# Altium schematic symbol library SamacSys.SchLib: 1235 symbols (part 6 of 13)
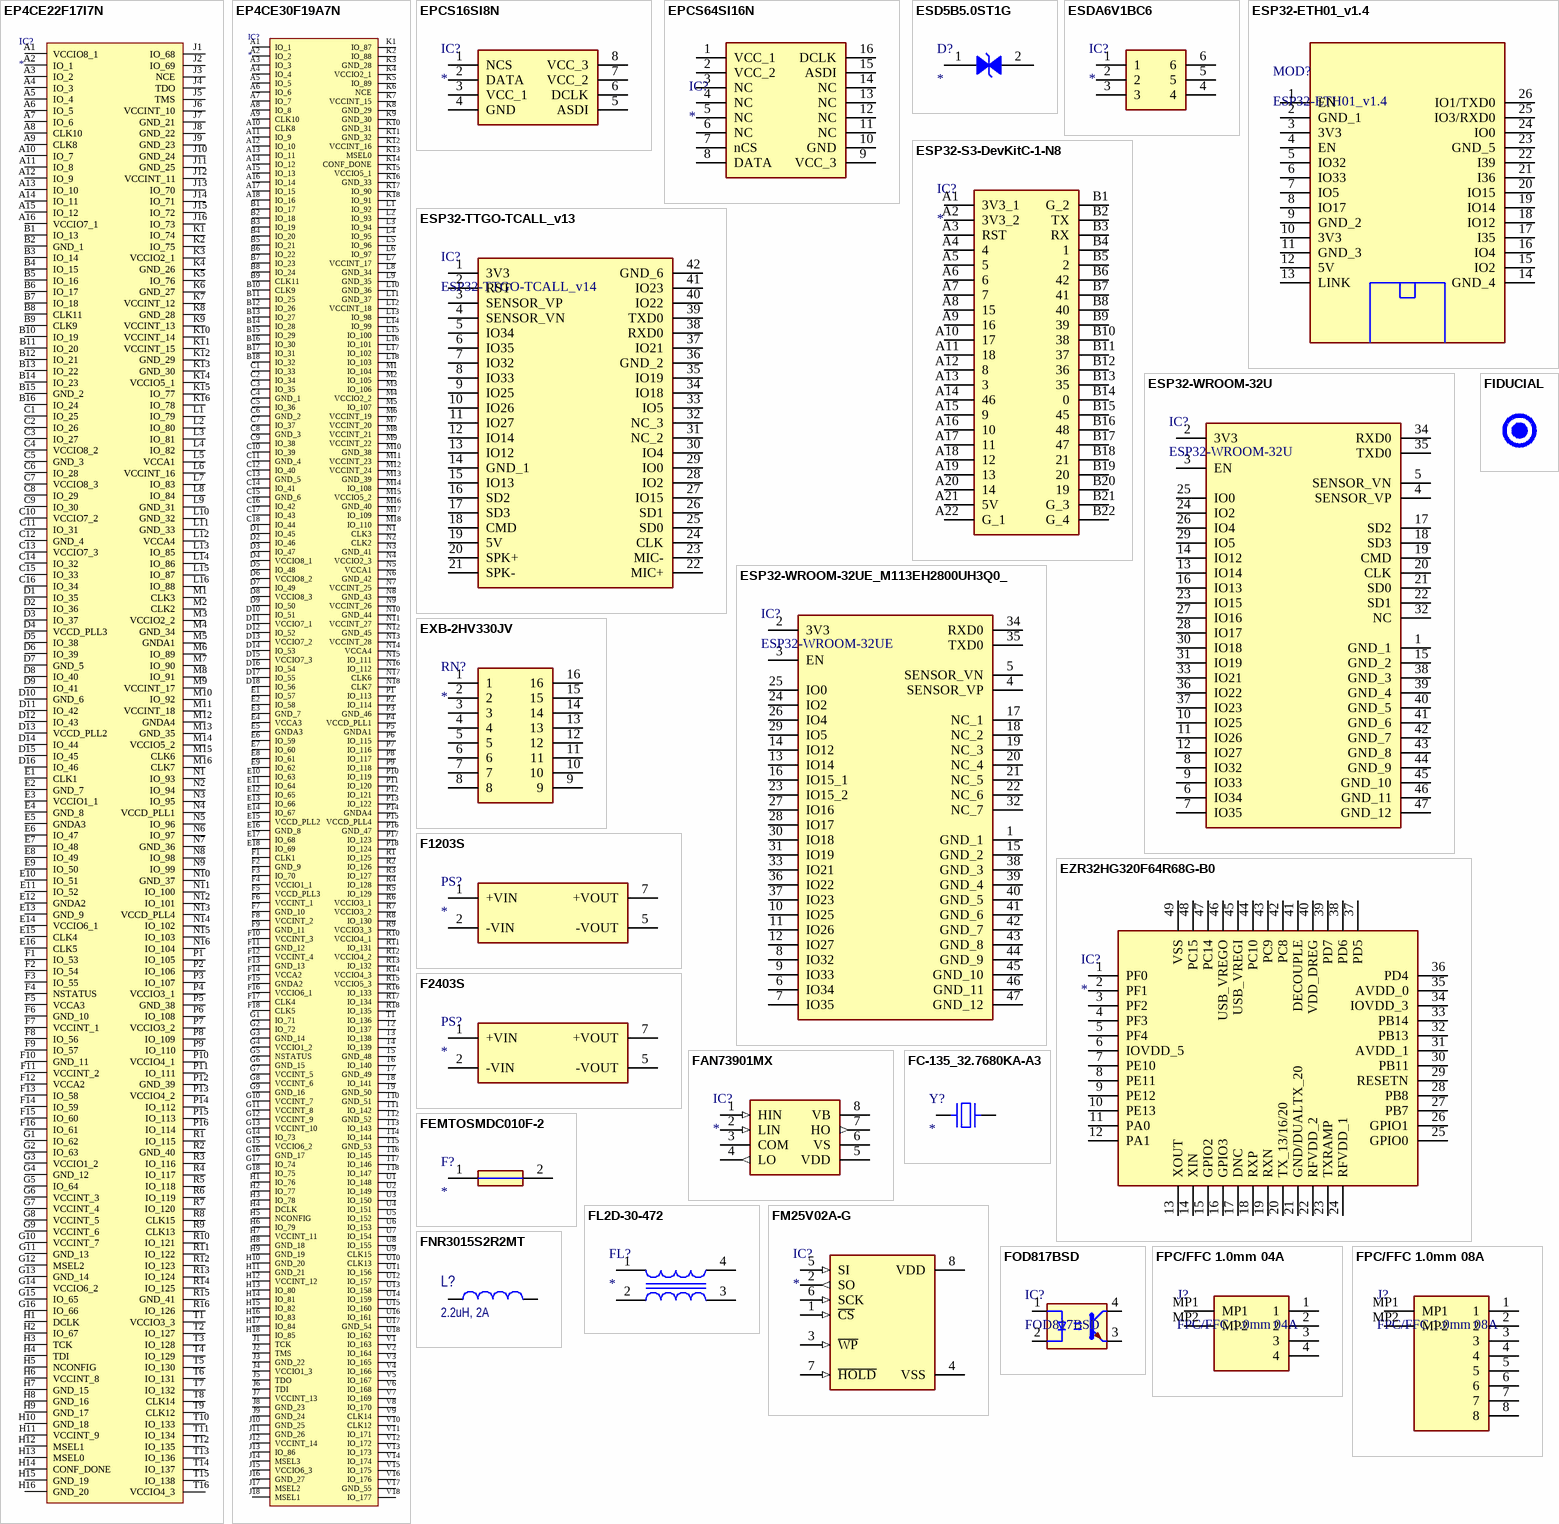
[diagram p50: symbols EP4CE22F17I7N to FPC/FFC 1.0mm 08A]

## FEMTOSMDC010F-2
designator F?
Fuse; Manufacturer_Name: LITTELFUSE; Manufacturer_Part_Number: FEMTOSMDC010F-2; Datasheet Link: https://www.mouser.com/datasheet/2/240/Littelfuse_PTC_FEMTOSMD_Catalog_Datasheet.pdf-1021717.pdf; Height: 0.85mm; Mouser Part Number: 650-FEMTOSMDC010F-2; Mouser Price/Stock: https://www.mouser.co.uk/ProductDetail/Littelfuse/FEMTOSMDC010F-2?qs=pBN%2FbMTRZdfivGqCKpN9Gw%3D%3D; Arrow Part Number: FEMTOSMDC010F-2; Arrow Price/Stock: https://www.arrow.com/en/products/femtosmdc010f-2/littelfuse?region=nac
footprint FUSC1608X85N (Footprint not found)
pins: 1, 2

## FIDUCIAL
designator FID?, comment Fiducial Point  (value not drawn)  (no BOM)
footprint fiducial_1_3 (Fiducial point Medium IN 1mm OUT 3mm)
footprint fiducial_1_2 (Fiducial point Small IN 1mm OUT 2mm)

## FL2D-30-472
designator FL?
Filter; Manufacturer_Name: Mornsun Power; Manufacturer_Part_Number: FL2D-30-472; Datasheet Link: https://www.mornsun-power.com/html/pdf/FL2D-30-472.html; Height: 23.5mm
footprint FL2D30472
pins: 1, 2, 3, 4

## FM25V02A-G
designator IC?
Integrated Circuit; Manufacturer_Name: Infineon; Manufacturer_Part_Number: FM25V02A-G; Datasheet Link: https://componentsearchengine.com/Datasheets/1/FM25V02A-G.pdf; Height: 1.549mm; Arrow Part Number: FM25V02A-G; Arrow Price/Stock: https://www.arrow.com/en/products/fm25v02a-g/infineon-technologies-ag?region=europe
footprint SOT127P602X155-8N
pins: 1 ~{CS} (in), 2 SO (out), 3 ~{WP} (in), 4 VSS (power), 5 SI (in), 6 SCK (in), 7 ~{HOLD} (in), 8 VDD (power)

## FNR3015S2R2MT
designator L?, comment 2.2uH, 2A
Inductor; Manufacturer: cjiang; Manufacturer Part Number: FNR3015S2R2MT; LCSC Part #: C167747
footprint FNR3015S
pins: 1, 2

## FOD817BSD
designator IC?
OPTOISOLATOR 5KV 1CH TRANS 4-SMD; Manufacturer_Name: onsemi; Datasheet Link: https://www.onsemi.com/pub/Collateral/FOD814-D.PDF; Height: 3.85mm; Manufacturer_Part_Number: FOD817BSD; Mouser Part Number: 512-FOD817BSD; Mouser Price/Stock: https://www.mouser.co.uk/ProductDetail/onsemi-Fairchild/FOD817BSD?qs=rOFvSC%252BbttTW%252BrbYJDyoCQ%3D%3D; Arrow Part Number: FOD817BSD; Arrow Price/Stock: null?region=asia
footprint SOP254P1016X385-4N (Footprint not found)
pins: 1, 2, 3, 4

## FPC/FFC 1.0mm 04A
designator J?
Connector, FFC, 4pin, 1mm; Manufacturer_Name: Ruichi; Datasheet Link: https://static.chipdip.ru/lib/135/DOC062135222.pdf; Height: 2.5mm
footprint LW10251-04 (FFC 1mm 4pin)
pins: 1, 2, 3, 4, MP1, MP2

## FPC/FFC 1.0mm 08A
designator J?
Connector, FFC, 8pin, 1mm; Manufacturer_Name: Ruichi; Datasheet Link: https://static.chipdip.ru/lib/135/DOC062135222.pdf; Height: 2.5
footprint LW10251-08 (FFC 1mm 8pin)
pins: 1, 2, 3, 4, 5, 6, 7, 8, MP1, MP2

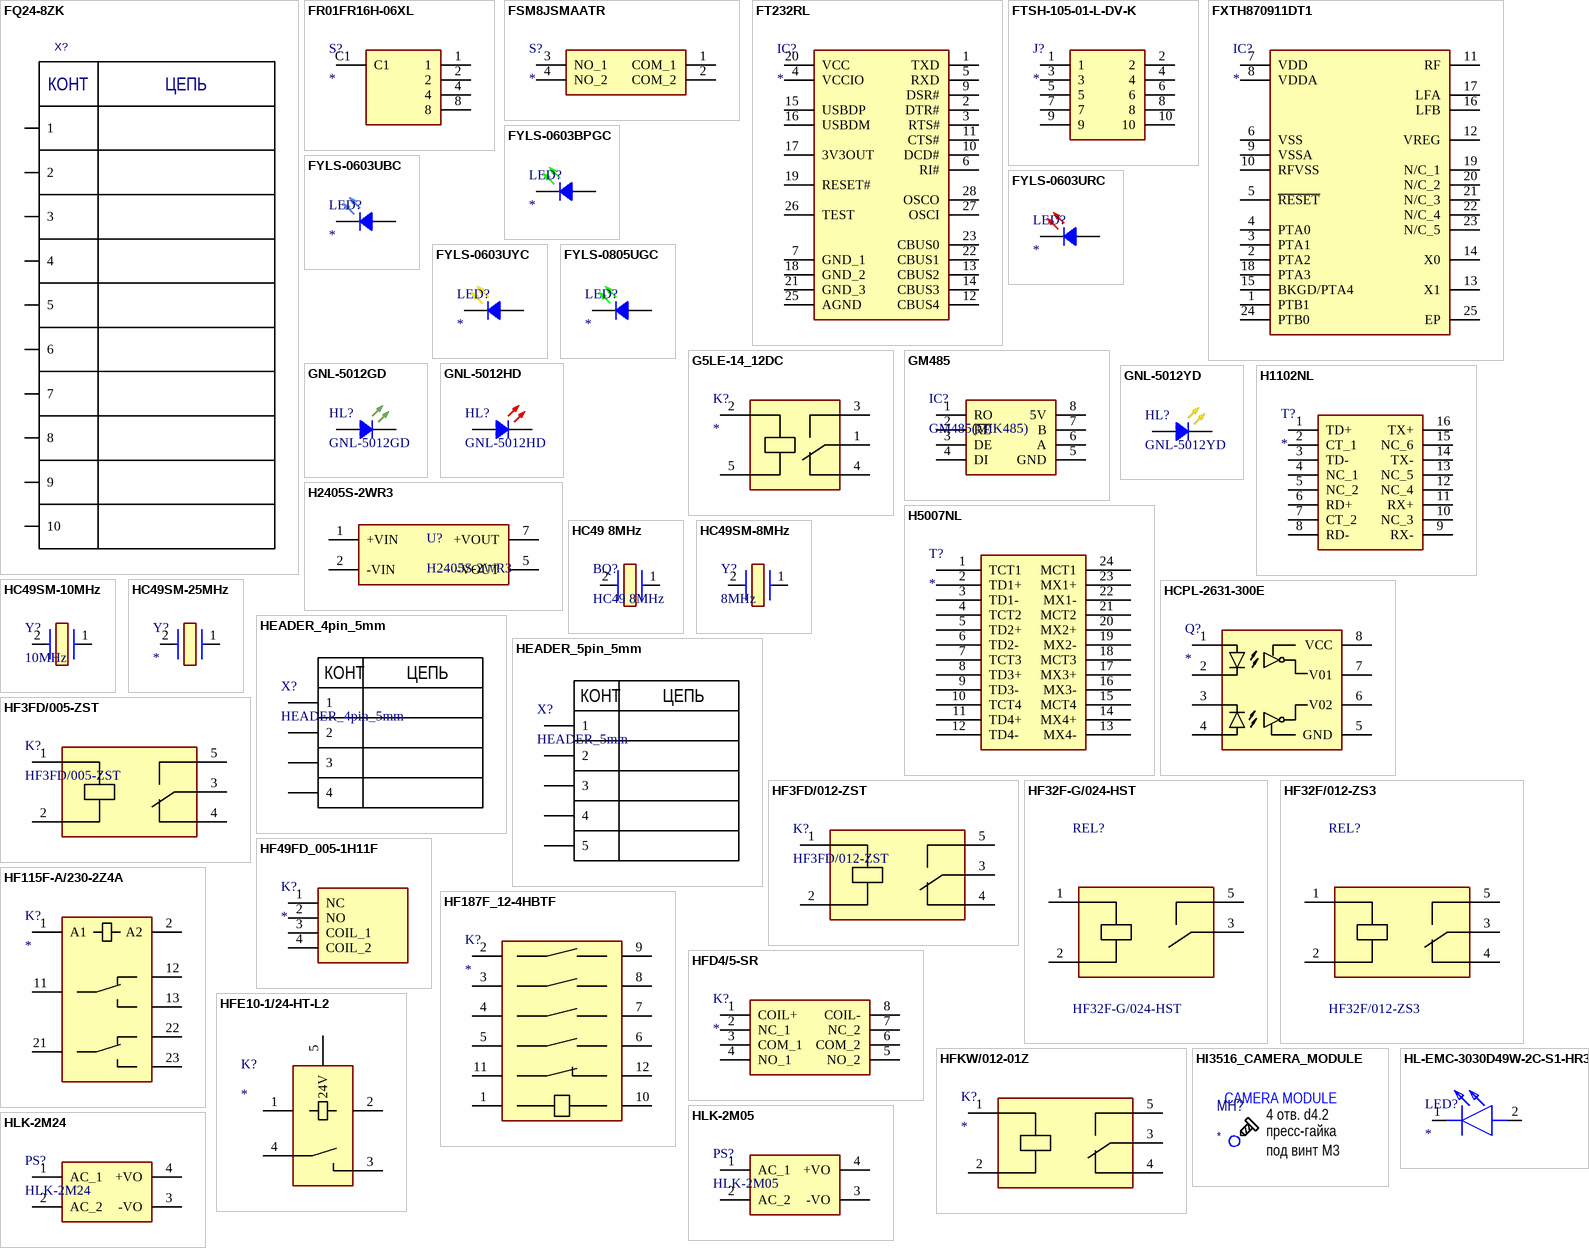
[diagram p17: symbols FQ24-8ZK to HLK-2M24]

## FQ24-8ZK
designator X?  (value not drawn)
Connector; Part Number: FQ24-8ZK; System: Connector
footprint FQ24-8ZK
pins: 1, 2, 3, 4, 5, 6, 7, 8, 9, 10
text: КОНТ; ЦЕПЬ

## FR01FR16H-06XL
designator S?
Switch; Manufacturer_Name: NKK Switches; Manufacturer_Part_Number: FR01FR16H-06XL; Datasheet Link: https://www.nkkswitches.com/pdf/FR01-2.pdf; Height: 10mm; Mouser Part Number: 633-FR01FR16H-06XL; Mouser Price/Stock: https://www.mouser.co.uk/ProductDetail/NKK-Switches/FR01FR16H-06XL?qs=g%252BEszo6zu8NJkaATc7RflA%3D%3D; Arrow Part Number: FR01FR16H-06XL; Arrow Price/Stock: https://www.arrow.com/en/products/fr01fr16h-06xl/nkk-switches
footprint FR01FR16H06XL
pins: 1, 2, 4, 8, C1

## FSM8JSMAATR
designator S?
Switch; Manufacturer_Name: TE Connectivity; Manufacturer_Part_Number: FSM8JSMAATR; Datasheet Link: https://www.mouser.co.uk/datasheet/2/418/1/NG_CD_2-1437565-7_V-1100109.pdf; Mouser Part Number: 506-FSM8JSMAATR; Mouser Price/Stock: https://www.mouser.co.uk/ProductDetail/TE-Connectivity-PB/FSM8JSMAATR?qs=jiqFPbo5wQUL4VmJsE%2Fhuw%3D%3D; Arrow Part Number: FSM8JSMAATR; Arrow Price/Stock: https://www.arrow.com/en/products/fsm8jsmaatr/te-connectivity?utm_currency=USD&region=nac
footprint FSM8JSMAATR
pins: 1 COM_1, 2 COM_2, 3 NO_1, 4 NO_2

## FT232RL
designator IC?
Integrated Circuit; Manufacturer_Name: FTDI Chip; Manufacturer_Part_Number: FT232RL-TUBE; Datasheet Link: http://www.ftdichip.com/Support/Documents/DataSheets/ICs/DS_FT232R.pdf; Height: 2mm; Mouser Part Number: 895-FT232RL-TUBE; Mouser Price/Stock: https://www.mouser.co.uk/ProductDetail/FTDI/FT232RL-TUBE?qs=D1%2FPMqvA100UF95YMvGN8w%3D%3D; Arrow Part Number: FT232RL-TUBE; Arrow Price/Stock: https://www.arrow.com/en/products/ft232rl-tube/ftdi-chip
footprint SOP65P780X200-28N
pins: 1 TXD, 2 DTR#, 3 RTS#, 4 VCCIO, 5 RXD, 6 RI#, 7 GND_1, 9 DSR#, 10 DCD#, 11 CTS#, 12 CBUS4, 13 CBUS2, 14 CBUS3, 15 USBDP, 16 USBDM, 17 3V3OUT, 18 GND_2, 19 RESET#, 20 VCC, 21 GND_3, 22 CBUS1, 23 CBUS0, 25 AGND, 26 TEST, 27 OSCI, 28 OSCO

## FTSH-105-01-L-DV-K
designator J?
Connector; Manufacturer_Name: SAMTEC; Manufacturer_Part_Number: FTSH-105-01-L-DV-K; Datasheet Link: https://www.arrow.com/en/products/ftsh-105-01-l-dv-k/samtec; Height: 6.1mm; Mouser Part Number: 200-FTSH10501LDVK; Mouser Price/Stock: https://www.mouser.co.uk/ProductDetail/Samtec/FTSH-105-01-L-DV-K?qs=%252B5JSS813miOqo3Vy%252BvhCFg%3D%3D; Arrow Part Number: FTSH-105-01-L-DV-K; Arrow Price/Stock: https://www.arrow.com/en/products/ftsh-105-01-l-dv-k/samtec?region=europe
footprint FTSH10501LDVK
pins: 1, 2, 3, 4, 5, 6, 7, 8, 9, 10

## FXTH870911DT1
designator IC?
Integrated Circuit; Manufacturer_Name: NXP; Manufacturer_Part_Number: FXTH870911DT1; Datasheet Link: https://datasheet.datasheetarchive.com/originals/distributors/DKDS-7/124449.pdf; Height: 2.3mm; Mouser Part Number: 841-FXTH870911DT1; Mouser Price/Stock: https://www.mouser.co.uk/ProductDetail/NXP-Semiconductors/FXTH870911DT1?qs=y0HsvvugQ47vJCxCR%252BmP0w%3D%3D; Arrow Part Number: FXTH870911DT1; Arrow Price/Stock: https://www.arrow.com/en/products/fxth870911dt1/nxp-semiconductors
footprint QFN100P700X700X230-25N-D
pins: 1 PTB1, 2 PTA2, 3 PTA1, 4 PTA0, 5 ~{RESET}, 6 VSS, 7 VDD, 8 VDDA, 9 VSSA, 10 RFVSS, 11 RF, 12 VREG, 13 X1, 14 X0, 15 BKGD/PTA4, 16 LFB, 17 LFA, 18 PTA3, 19 N/C_1, 20 N/C_2, 21 N/C_3, 22 N/C_4, 23 N/C_5, 24 PTB0, 25 EP

## FYLS-0603BPGC
designator LED?
LED, 0603, GREEN; Manufacturer_Name: FORYARD; Manufacturer_Part_Number: FYLS-0603BPGC; Datasheet Link: https://v4.cecdn.yun300.cn/100001_2003185297/7%20FYLS-0603BXXXC-D.pdf; Height: 0.6mm
footprint LEDC1608X55N_GREEN
pins: 1 A, 2 C

## FYLS-0603UBC
designator LED?
LED, 0603, BLUE; Manufacturer_Name: FORYARD; Manufacturer_Part_Number: FYLS-0603UBC; Datasheet Link: https://v4.cecdn.yun300.cn/100001_2003185297/7%20FYLS-0603BXXXC-D.pdf; Height: 0.6mm
footprint LEDC1608X55N_BLUE
pins: 1 A, 2 C

## FYLS-0603URC
designator LED?
LED, 0603, RED; Manufacturer_Name: FORYARD; Manufacturer_Part_Number: FYLS-0603URC; Datasheet Link: https://v4.cecdn.yun300.cn/100001_2003185297/7%20FYLS-0603BXXXC-D.pdf; Height: 0.6mm
footprint LEDC1608X55N_RED
pins: 1 A, 2 C

## FYLS-0603UYC
designator LED?
LED, 0603, YELLOW; Manufacturer_Name: FORYARD; Manufacturer_Part_Number: FYLS-0603UYC; Datasheet Link: https://v4.cecdn.yun300.cn/100001_2003185297/7%20FYLS-0603BXXXC-D.pdf; Height: 0.6mm
footprint LEDC1608X55N_YELLOW
pins: 1 A, 2 C

## FYLS-0805UGC
designator LED?
LED, 0805, GREEN; Manufacturer_Name: FORYARD; Manufacturer_Part_Number: FYLS-0805UGC; Datasheet Link: https://v4.cecdn.yun300.cn/100001_2003185297/7%20FYLS-0603BXXXC-D.pdf; Height: 0.6mm
footprint LEDC2012X110N
pins: 1 A, 2 C

## G5LE-14_12DC
designator K?
Relay; Manufacturer_Name: Omron Electronics; Manufacturer_Part_Number: G5LE-14 12DC; Datasheet Link: https://www.omron.com/ecb/products/pdf/en-g5le.pdf; Arrow Part Number: G5LE-14 12DC; Arrow Price/Stock: https://www.arrow.com/en/products/g5le1412dc/omron
footprint G5LE-1
pins: 1 COIL_1, 2 NC, 3 NO, 4 COIL_2, 5 COM

## GM485
designator IC?, comment GM485(MIK485)
Integrated Circuit, RS-485; Manufacturer_Name: Analog Devices; Manufacturer_Part_Number: ADM3485ARZ; Datasheet Link: https://tellur-el.ru/upload/iblock/10b/f24nra7n0usjcjwdd7j1s1y0al2gk06p.pdf; Height: 1.75mm; Mouser Part Number: 584-ADM3485ARZ; Mouser Price/Stock: https://www.mouser.co.uk/ProductDetail/Analog-Devices/ADM3485ARZ?qs=BpaRKvA4VqFcLMPh5cVl%252BQ%3D%3D; Arrow Part Number: ADM3485ARZ; Arrow Price/Stock: https://www.arrow.com/en/products/adm3485arz/analog-devices?region=nac
footprint SOIC127P600X175-8N
pins: 1 RO, 2 ~{RE}, 3 DE, 4 DI, 5 GND, 6 A, 7 B, 8 5V

## GNL-5012GD
designator HL?
LED, 5mm, Green; Manufacturer_Name: G-NOR ELECTRONICS; Datasheet Link: https://static.chipdip.ru/lib/796/DOC059796154.pdf; Manufacturer_Part_Number: GNL-5012GD
footprint LED_5mm_green (Footprint not found)
pins: 1 C, 2 A

## GNL-5012HD
designator HL?
LED, 5mm, Red; Manufacturer_Name: G-NOR ELECTRONICS; Datasheet Link: https://static.chipdip.ru/lib/815/DOC059815856.pdf; Manufacturer_Part_Number: GNL-5012HD
footprint LED_5mm_red
pins: 1 C, 2 A

## GNL-5012YD
designator HL?
LED, 5mm, Green; Manufacturer_Name: G-NOR ELECTRONICS; Datasheet Link: https://static.chipdip.ru/lib/796/DOC059796154.pdf; Manufacturer_Part_Number: GNL-5012YD
footprint LED_5mm_yellow
pins: 1 C, 2 A

## H1102NL
designator T?
Transformer; Manufacturer_Name: Pulse Electronics; Manufacturer_Part_Number: H1102NL; Datasheet Link: https://productfinder.pulseeng.com/products/datasheets/h1102nl.pdf; Height: 5.97mm; Mouser Part Number: 673-H1102NL; Mouser Price/Stock: https://www.mouser.co.uk/ProductDetail/Pulse-Electronics/H1102NL?qs=EKu32SdDin%2FHU33L94JZxw%3D%3D; Arrow Part Number: H1102NL; Arrow Price/Stock: https://www.arrow.com/en/products/h1102nl/pulse-electronics-corporation?region=europe
footprint SOIC127P940X597-16N
pins: 1 TD+, 2 CT_1, 3 TD-, 4 NC_1, 5 NC_2, 6 RD+, 7 CT_2, 8 RD-, 9 RX-, 10 NC_3, 11 RX+, 12 NC_4, 13 NC_5, 14 TX-, 15 NC_6, 16 TX+

## H2405S-2WR3
designator U?
Power Supply, 2W isolated, DIP
footprint H_S-2WR3
pins: 1 +VIN, 2 -VIN, 5 -VOUT, 7 +VOUT

## H5007NL
designator T?
Transformer; Manufacturer_Name: Pulse Electronics; Manufacturer_Part_Number: H5007NL; Datasheet Link: https://productfinder.pulseeng.com/products/datasheets/HC500.pdf; Height: 5.51mm; Mouser Part Number: 673-H5007NL; Mouser Price/Stock: https://www.mouser.co.uk/ProductDetail/Pulse-Electronics/H5007NL?qs=EKu32SdDin9FBxETK8sXDg%3D%3D; Arrow Part Number: H5007NL; Arrow Price/Stock: https://www.arrow.com/en/products/h5007nl/pulse-electronics-corporation?region=nac
footprint SOIC127P1600X551-24N
pins: 1 TCT1, 2 TD1+, 3 TD1-, 4 TCT2, 5 TD2+, 6 TD2-, 7 TCT3, 8 TD3+, 9 TD3-, 10 TCT4, 11 TD4+, 12 TD4-, 13 MX4-, 14 MX4+, 15 MCT4, 16 MX3-, 17 MX3+, 18 MCT3, 19 MX2-, 20 MX2+, 21 MCT2, 22 MX1-, 23 MX1+, 24 MCT1

## HC49 8MHz
designator BQ?
Crystal or Oscillator; Manufacturer_Name: QUARTZ HC-49; Height: 3.5mm; Manufacturer_Part_Number: 8 MHz
footprint HC49
pins: 1, 2 CRYSTAL_2

## HC49SM-8MHz
designator Y?, comment 8MHz
Crystal or Oscillator; Manufacturer_Part_Number: HC49SM-25MHz; Height: 4mm
footprint HC49SM (Footprint not found)
pins: 1, 2

## HC49SM-10MHz
designator Y?, comment 10MHz
Crystal or Oscillator; Manufacturer_Part_Number: HC49SM-10MHz; Height: 4mm
footprint HC49SM (Footprint not found)
pins: 1, 2

## HC49SM-25MHz
designator Y?
Crystal or Oscillator; Manufacturer_Part_Number: HC49SM-25MHz; Height: 4mm
footprint HC49SM1230506016ATF
footprint HC49
pins: 1, 2

## HCPL-2631-300E
designator Q?
Phototransistor; Manufacturer_Name: Avago Technologies; Manufacturer_Part_Number: HCPL-2631-300E; Datasheet Link: https://www.mouser.com/datasheet/2/678/V02-0940EN_DS_6N137_2018-03-23-1112306.pdf; Mouser Part Number: 630-HCPL-2631-300E; Mouser Price/Stock: https://www.mouser.co.uk/ProductDetail/Broadcom-Avago/HCPL-2631-300E?qs=s%252BgfxR24RQ5y0yf12DdOLQ%3D%3D
footprint HCPL2200300E
pins: 1 A_1, 2 K_1, 3 K_2, 4 A_2, 5 GND, 6 V02, 7 V01, 8 VCC

## HEADER_4pin_5mm
designator X?  (no BOM)
Connector
footprint HEADER_4pin_5mm (Footprint not found)
pins: 1, 2, 3, 4
text: КОНТ; ЦЕПЬ

## HEADER_5pin_5mm
designator X?, comment HEADER_5mm  (no BOM)
Connector
footprint HEADER_5pin_5mm (Footprint not found)
pins: 1, 2, 3, 4, 5
text: КОНТ; ЦЕПЬ

## HF3FD/005-ZST
designator K?
Relay, 5V Coil, Form C; Manufacturer_Name: Hongfa; Datasheet Link: http://www.hongfaamerica.com/hq/PDF/HF3FD_en.pdf; Height: 15.9mm; Manufacturer_Part_Number: HF3FD/005-ZST
footprint HF3FD012ZTF257
pins: 1 COIL_1, 2 NC, 3 NO, 4 COIL_2, 5 COM

## HF3FD/012-ZST
designator K?
Relay, 12V Coil, 5V/240VAC, Form C; Manufacturer_Name: Hongfa; Datasheet Link: http://www.hongfaamerica.com/hq/PDF/HF3FD_en.pdf; Height: 15.9mm; Manufacturer_Part_Number: HF3FD/012-ZST
footprint HF3FD012ZTF257
pins: 1 COIL_1, 2 NC, 3 NO, 4 COIL_2, 5 COM

## HF32F-G/024-HST
designator REL?
Power Relay 24VDC COIL 10A, 1 Form A
footprint HF32F
pins: 1 COIL_1, 2 NC, 3 NO, 5 COM

## HF32F/012-ZS3
designator REL?
Power Relay 12VDC COIL 10A, 1 Form C
footprint HF32F
pins: 1 COIL_1, 2 NC, 3 NO, 4 COIL_2, 5 COM

## HF49FD_005-1H11F
designator K?
Relay or Contactor; Manufacturer_Name: Hongfa; Manufacturer_Part_Number: HF49FD/005-1H11F; Datasheet Link: https://www.tme.eu/en/Document/f3d887acae5a2f74997c256c6736c56d/HF49FD_en.pdf; Height: 12mm
footprint HF49FD0051H11F
pins: 1 NC, 2 NO, 3 COIL_1, 4 COIL_2

## HF115F-A/230-2Z4A
designator K?
Relay o; Manufacturer_Name: Hongfa; Manufacturer_Part_Number: HF115F-A/230-2Z4A; Datasheet Link: https://www.promelec.ru/fs/sources/18/1d/46/29/ea14cb585d76c992e04a6d48.pdf; Height: 16mm; Arrow Part Number: HF115FK/12-2Z4T(610); Arrow Price/Stock: https://www.arrow.com/en/products/hf115fk12-2z4t-610/hongfa-europe-gmbh
footprint HF115FK122Z4T610
pins: 1 A1, 2 A2, 11 1_COM, 12 1_NC, 13 1_NO, 21 2_COM, 22 2_NC, 23 2_NO

## HF187F_12-4HBTF
designator K?
Relay or Contactor; Manufacturer_Name: Hongfa; Manufacturer_Part_Number: HF187F/12-4HBTF; Datasheet Link: https://source.hongfa.com//pdf/web/viewer.html?file=\Uploads\Product\PDF\HF187F_en.pdf&timestamp=1680773911; Height: 47mm
footprint HF187F124HBTF
pins: 1 COIL_1, 2 NO_1, 3 NO_2, 4 NO_3, 5 NO_4, 6 COM_1, 7 COM_2, 8 COM_3, 9 COM_4, 10 COIL_2, 11 NC, 12 COM_5

## HFD4/5-SR
designator K?
Relay or Contactor; Manufacturer_Name: Hongfa; Manufacturer_Part_Number: HFD4/4.5-SR; Datasheet Link: https://source.hongfa.com//Api/DownloadPdf/353; Height: 6.05mm; Arrow Part Number: HFD4/4.5-SR; Arrow Price/Stock: https://www.arrow.com/en/products/hfd44.5-sr/hongfa-europe-gmbh?region=europe
footprint HFD445SR
pins: 1 COIL+, 2 NC_1, 3 COM_1, 4 NO_1, 5 NO_2, 6 COM_2, 7 NC_2, 8 COIL-

## HFE10-1/24-HT-L2
designator K?
Relay, 50A, 24V; Manufacturer_Name: Hongfa; Manufacturer_Part_Number: HFE10-1/24-HT-L2; Datasheet Link: https://cdn.promelec.ru/upload/items/2020/09/08/hfe10_en.pdf; Height: 30; Arrow Part Number: HF115FK/12-2Z4T(610); Arrow Price/Stock: https://www.arrow.com/en/products/hf115fk12-2z4t-610/hongfa-europe-gmbh
footprint HFE10112HSTL2257
pins: 1 A1, 2 A2, 3 NO, 4 COM, 5 24V

## HFKW/012-01Z
designator K?
Relay; Manufacturer_Name: HF(Xiamen Hongfa Electroacoustic); Manufacturer_Part_Number: HFKW/012-1Z; Datasheet Link: https://img.ozdisan.com/ETicaret_Dosya/341245_8627675.pdf; Height: 15.5mm; LCSC Part #: C9221
footprint HFKW Relay
pins: 1 COIL_1, 2 NC, 3 NO, 4 COIL_2, 5 COM

## HI3516_CAMERA_MODULE
designator MH?
4 * KF2-M3
footprint CAMERA_MODULE (Footprint not found)
text: CAMERA MODULE; 4 отв. d4.2; пресс-гайка; под винт M3

## HL-EMC-3030D49W-2C-S1-HR3
designator LED?
LED; Manufacturer_Name: Hongli Zhihui (HONGLITRONIC); Manufacturer_Part_Number: HL-EMC-3030D49W-2C-S1-HR3; Datasheet Link: https://4donline.ihs.com/images/VipMasterIC/IC/GHTC/GHTCS01244/GHTCS01244-1.pdf?hkey=EF798316E3902B6ED9A73243A3159BB0; Height: 0.67mm
footprint HLEMC3030D49W2CS1HR3
pins: 1 K, 2 A

## HLK-2M05
designator PS?
Power Supply 2W 220VAC 5VDC 400mA; Manufacturer_Name: Hi-Link; Height: 19mm; Manufacturer_Part_Number: HLK-2M05
footprint HLK2M
pins: 1 AC_1, 2 AC_2, 3 -VO, 4 +VO

## HLK-2M24
designator PS?
Power Supply 2W 220VAC 24VDC 83mA; Manufacturer_Name: Hi-Link; Height: 19mm; Manufacturer_Part_Number: HLK-2M24
footprint HLK2M
pins: 1 AC_1, 2 AC_2, 3 -VO, 4 +VO

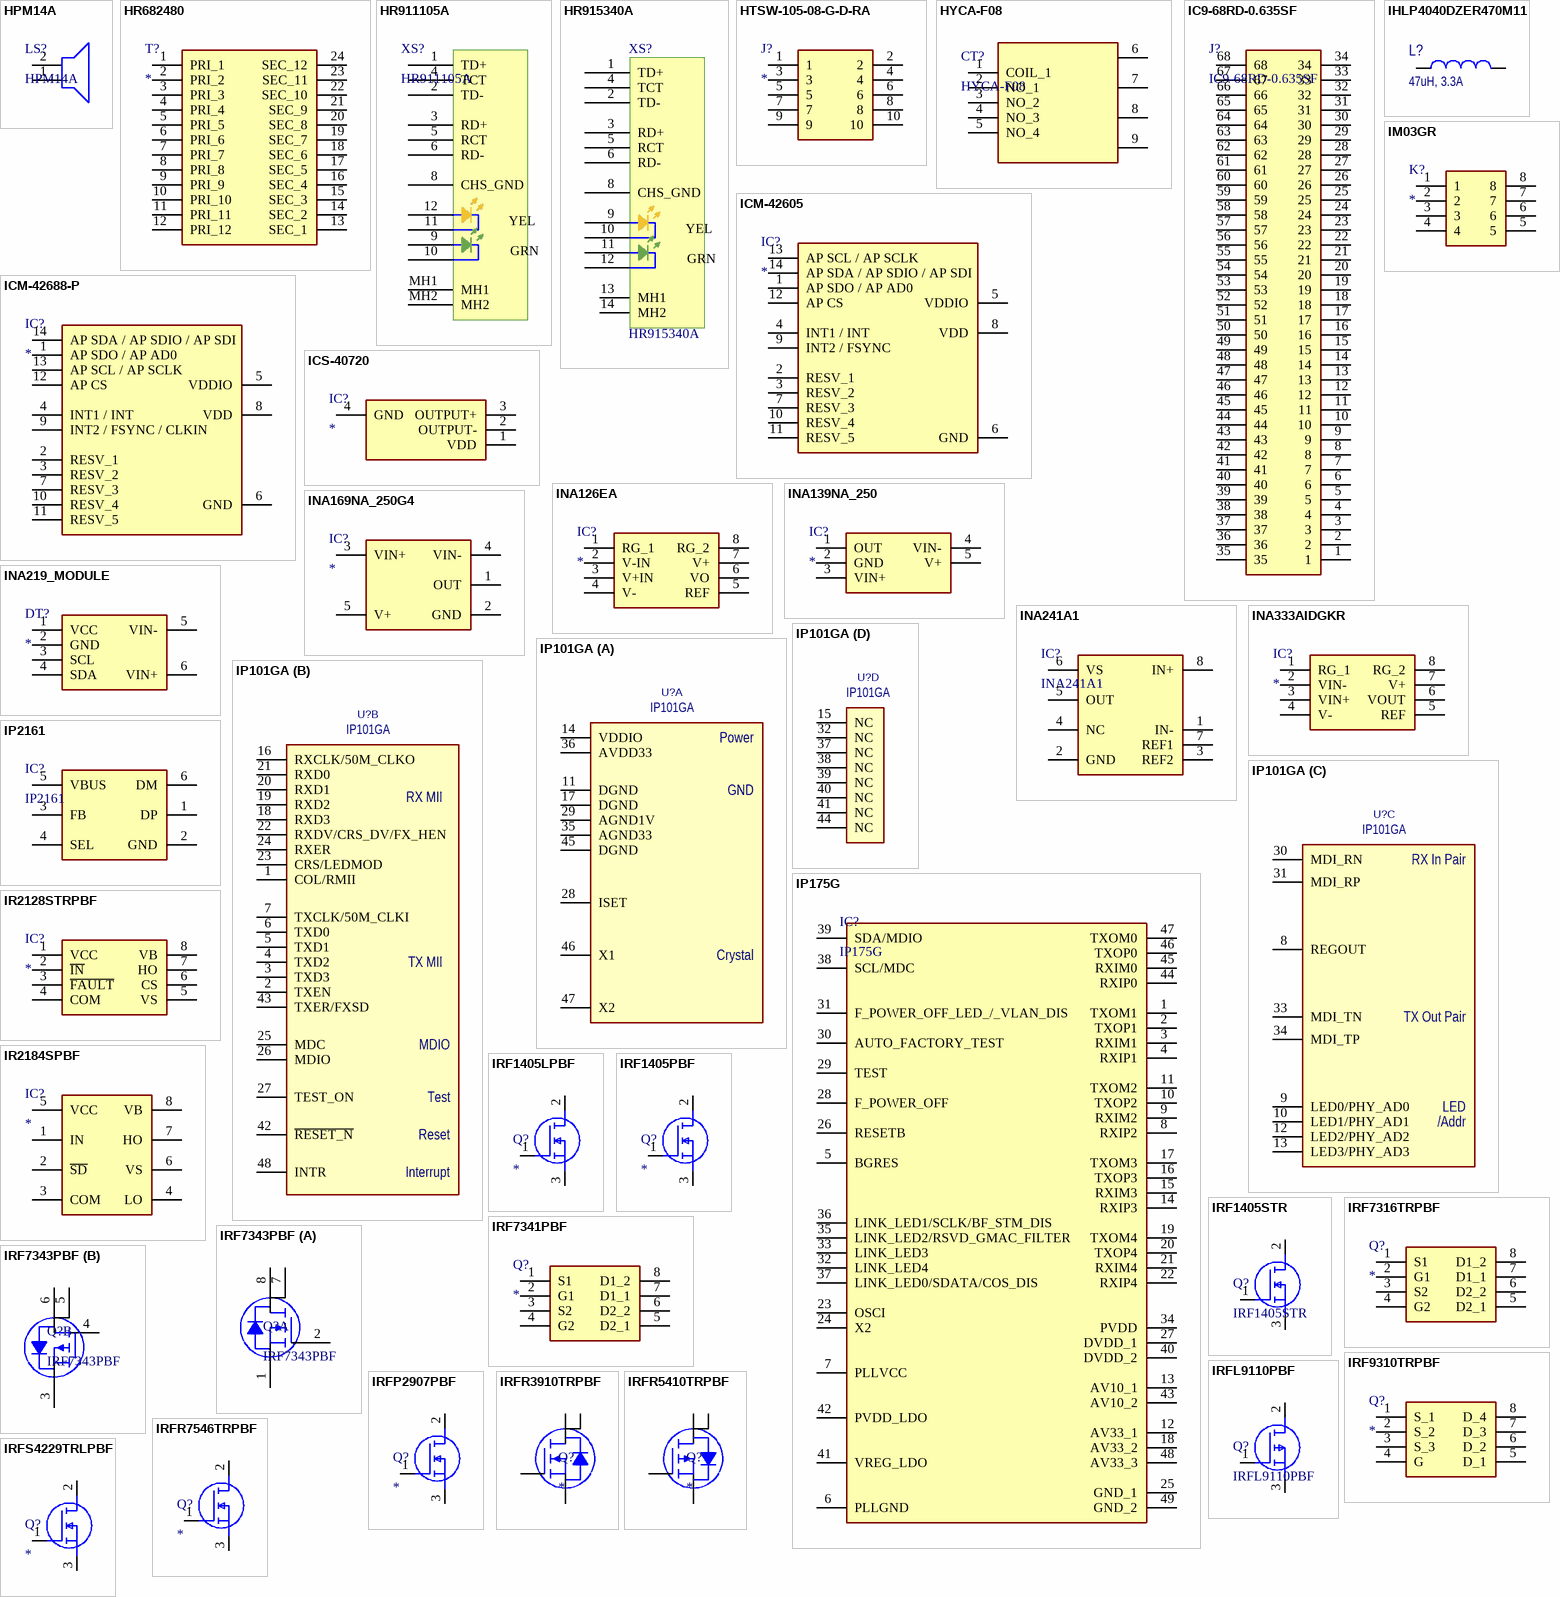
[diagram p18: symbols HPM14A to IRFS4229TRLPBF]

## HPM14A
designator LS?
Buzzer, 5V; Manufacturer_Name: JL World; Datasheet Link: https://static.chipdip.ru/lib/243/DOC000243409.pdf; Manufacturer_Part_Number: HPM14A
footprint HPM14A
pins: 1, 2

## HR682480
designator T?
Transformer; Manufacturer_Name: HR COMPONENTS/IVO; Manufacturer_Part_Number: HR682480; Datasheet Link: http://www.hqelec.com/spec/hanrun/hr682480.pdf; Height: 4.318mm
footprint SOP99P1016X432-24N
pins: 1 PRI_1, 2 PRI_2, 3 PRI_3, 4 PRI_4, 5 PRI_5, 6 PRI_6, 7 PRI_7, 8 PRI_8, 9 PRI_9, 10 PRI_10, 11 PRI_11, 12 PRI_12, 13 SEC_1, 14 SEC_2, 15 SEC_3, 16 SEC_4, 17 SEC_5, 18 SEC_6, 19 SEC_7, 20 SEC_8, 21 SEC_9, 22 SEC_10, 23 SEC_11, 24 SEC_12

## HR911105A
designator XS?
Connector, RJ-45, MagJack; Manufacturer_Name: Hanrun Electronics; Datasheet Link: https://datasheet.lcsc.com/szlcsc/Zhongshan-HanRun-Elec-HR911105A_C12074.pdf; Height: 13.75mm; Manufacturer_Part_Number: HR911105A
footprint HR911105A (Footprint not found)
pins: 1 TD+, 2 TD-, 3 RD+, 4 TCT, 5 RCT, 6 RD-, 8 CHS_GND, 9 P9, 10 P10, 11 P11, 12 P12, MH1, MH2
text: YEL; GRN

## HR915340A
designator XS?
Connector; Manufacturer_Name: Hanrun Electronics; Datasheet Link: https://datasheet.lcsc.com/lcsc/2103161034_HANRUN-Zhongshan-HanRun-Elec-HR915340A_C2760325.pdf; Height: 13.8mm; Manufacturer_Part_Number: HR915340A
footprint HR915340A
pins: 1 TD+, 2 TD-, 3 RD+, 4 TCT, 5 RCT, 6 RD-, 8 CHS_GND, 9 P9, 10 P10, 11 P11, 12 P12, 13 MH1, 14 MH2
text: YEL; GRN

## HTSW-105-08-G-D-RA
designator J?
Connector; Manufacturer_Name: SAMTEC; Manufacturer_Part_Number: HTSW-105-08-G-D-RA; Datasheet Link: https://componentsearchengine.com/Datasheets/2/HTSW-105-08-G-D-RA.pdf; Height: 6.1mm; Mouser Part Number: 200-HTSW10508GDRA; Mouser Price/Stock: https://www.mouser.co.uk/ProductDetail/Samtec/HTSW-105-08-G-D-RA?qs=0lQeLiL1qyZb8ERiSnm3Lg%3D%3D; Arrow Part Number: HTSW-105-08-G-D-RA; Arrow Price/Stock: https://www.arrow.com/en/products/htsw-105-08-g-d-ra/samtec?region=europe
footprint HDRRA10W64P254_2X5_1270X254X610P
pins: 1, 2, 3, 4, 5, 6, 7, 8, 9, 10

## HYCA-F08
designator CT?
Resudual Current Sensor; Height: 27mm; Manufacturer_Part_Number: HYCA-F08
footprint HYCAF08 (Footprint not found)
pins: 1 COIL_1, 2 NO_1, 3 NO_2, 4 NO_3, 5 NO_4, 6 COM_1, 7 COM_2, 8 COM_3, 9 COM_4

## IC9-68RD-0.635SF
designator J?
Connector Card Bus Socket; Manufacturer_Name: Hirose; Height: 2.83mm; Manufacturer_Part_Number: IC9-68RD-0.635SF
footprint IC9-68RD-0.635SF (Footprint not found)
pins: 1, 2, 3, 4, 5, 6, 7, 8, 9, 10, 11, 12, 13, 14, 15, 16, 17, 18, 19, 20, 21, 22, 23, 24, 25, 26, 27, 28, 29, 30, 31, 32, 33, 34, 35, 36, 37, 38, 39, 40, 41, 42, 43, 44, 45, 46, 47, 48, 49, 50, 51, 52, 53, 54, 55, 56, 57, 58, 59, 60, 61, 62, 63, 64, 65, 66, 67, 68

## ICM-42605
designator IC?
Accelerometer, Low Power High Performance 6-Axis MEMS Device; Manufacturer_Name: TDK; Manufacturer_Part_Number: ICM-42605; Datasheet Link: https://3cfeqx1hf82y3xcoull08ihx-wpengine.netdna-ssl.com/wp-content/uploads/2020/09/DS-000292-ICM-42605-v1.5.pdf; Mouser Part Number: 410-ICM-42605; Mouser Price/Stock: https://www.mouser.co.uk/ProductDetail/TDK-InvenSense/ICM-42605?qs=gZXFycFWdAO0MPgeewGYjQ%3D%3D; Arrow Part Number: ICM-42605; Arrow Price/Stock: https://www.arrow.com/en/products/icm-42605/invensense?utm_currency=USD&region=europe
footprint IIM42352
pins: 1 AP SDO / AP AD0, 2 RESV_1, 3 RESV_2, 4 INT1 / INT, 5 VDDIO, 6 GND, 7 RESV_3, 8 VDD, 9 INT2 / FSYNC, 10 RESV_4, 11 RESV_5, 12 AP CS, 13 AP SCL / AP SCLK, 14 AP SDA / AP SDIO / AP SDI

## ICM-42688-P
designator IC?
Integrated Circuit; Manufacturer_Name: TDK; Manufacturer_Part_Number: ICM-42688-P; Datasheet Link: https://3cfeqx1hf82y3xcoull08ihx-wpengine.netdna-ssl.com/wp-content/uploads/2021/06/DS-000347-ICM-42688-P-v1.5.pdf; Mouser Part Number: 410-ICM-42688-P; Mouser Price/Stock: https://www.mouser.co.uk/ProductDetail/TDK-InvenSense/ICM-42688-P?qs=OlC7AqGiEDk8QrNAV728zw%3D%3D; Arrow Part Number: ICM-42688-P; Arrow Price/Stock: https://www.arrow.com/en/products/icm-42688-p/invensense?utm_currency=USD&region=nac
footprint IIM42352
pins: 1 AP SDO / AP AD0, 2 RESV_1, 3 RESV_2, 4 INT1 / INT, 5 VDDIO, 6 GND, 7 RESV_3, 8 VDD, 9 INT2 / FSYNC / CLKIN, 10 RESV_4, 11 RESV_5, 12 AP CS, 13 AP SCL / AP SCLK, 14 AP SDA / AP SDIO / AP SDI

## ICS-40720
designator IC?
Integrated Circuit; Manufacturer_Name: TDK; Manufacturer_Part_Number: ICS-40720; Datasheet Link: https://product.tdk.com/system/files/dam/doc/product/sw_piezo/mic/mems-mic/data_sheet/ds-000045-v1.3-ics-40720.pdf; Height: 1.3mm; Mouser Part Number: 410-ICS-40720; Mouser Price/Stock: https://www.mouser.co.uk/ProductDetail/TDK-InvenSense/ICS-40720?qs=u4fy%2FsgLU9Pq9KZ5FvTv0Q%3D%3D
footprint ICS40720
pins: 1 VDD, 2 OUTPUT-, 3 OUTPUT+, 4 GND

## IHLP4040DZER470M11
designator L?, comment 47uH, 3.3A
Inductor; Manufacturer: VISHAY; Manufacturer Part Number: IHLP4040DZER470M11
footprint INDPM108102X400N
pins: 1, 2

## IM03GR
designator K?
Relay or Contactor; Manufacturer_Name: TE Connectivity; Manufacturer_Part_Number: IM03GR; Datasheet Link: https://datasheet.datasheetarchive.com/originals/distributors/Datasheets_SAMA/af0478e68580ade93768a4593bd7be66.pdf; Mouser Part Number: 655-IM03GR; Mouser Price/Stock: https://www.mouser.co.uk/ProductDetail/TE-Connectivity/IM03GR?qs=h8jywBNgiq20bLq7q22y%252Bg%3D%3D; Arrow Part Number: IM03GR; Arrow Price/Stock: https://www.arrow.com/en/products/im03gr/te-connectivity?utm_currency=USD&region=nac
footprint IM06GR
pins: 1, 2, 3, 4, 5, 6, 7, 8

## INA126EA
designator IC?
Integrated Circuit; Manufacturer_Name: Texas Instruments; Manufacturer_Part_Number: INA126EA; Datasheet Link: https://datasheet.datasheetarchive.com/originals/distributors/Datasheets-SFU2/DSASFU100026213.pdf; Height: 1.1mm
footprint SOP65P490X110-8N
pins: 1 RG_1, 2 V-IN, 3 V+IN, 4 V-, 5 REF, 6 VO, 7 V+, 8 RG_2

## INA139NA_250
designator IC?
Integrated Circuit; Manufacturer_Name: Texas Instruments; Manufacturer_Part_Number: INA139NA/250; Datasheet Link: http://www.ti.com/lit/ds/symlink/ina139.pdf; Height: 1.45mm; Mouser Part Number: 595-INA139NA/250; Mouser Price/Stock: https://www.mouser.co.uk/ProductDetail/Texas-Instruments/INA139NA-250?qs=VBduBm9rCJQSYOixXF05Zw%3D%3D; Arrow Part Number: INA139NA/250; Arrow Price/Stock: https://www.arrow.com/en/products/ina139na250/texas-instruments?region=nac
footprint SOT95P280X145-5N
pins: 1 OUT, 2 GND, 3 VIN+, 4 VIN-, 5 V+

## INA169NA_250G4
designator IC?
Integrated Circuit; Manufacturer_Name: Texas Instruments; Manufacturer_Part_Number: INA169NA/250G4; Datasheet Link: https://www.ti.com/lit/ds/symlink/ina169.pdf?ts=1607068074354&ref_url=https%253A%252F%252Fwww.google.com%252F; Height: 1.45mm; Mouser Part Number: 595-INA169NA/250G4; Mouser Price/Stock: https://www.mouser.co.uk/ProductDetail/Texas-Instruments/INA169NA-250G4?qs=yhNIDeTE%252Bcayuu5ly9H%252BEA%3D%3D; Arrow Part Number: INA169NA/250G4; Arrow Price/Stock: https://www.arrow.com/en/products/ina169na250g4/texas-instruments?region=nac
footprint SOT95P280X145-5N
pins: 1 OUT, 2 GND, 3 VIN+, 4 VIN-, 5 V+

## INA219_MODULE
designator DT?
Current Sensor module, 3.2A, 26V; Manufacturer_Name: Vishay; Manufacturer_Part_Number: DF01SA-E3/45; Datasheet Link: https://www.arrow.com/en/products/df01sa-e345/vishay; Height: 3.63mm; Mouser Part Number: 625-DF01SA-E3; Mouser Price/Stock: https://www.mouser.co.uk/ProductDetail/Vishay-General-Semiconductor/DF01SA-E3-45?qs=lTgc38YOCCrpaTKQDA1AVA%3D%3D; Arrow Part Number: DF01SA-E3/45; Arrow Price/Stock: https://www.arrow.com/en/products/df01sa-e345/vishay?region=nac
footprint INA219_MODULE
pins: 1 VCC, 2 GND, 3 SCL, 4 SDA, 5 VIN-, 6 VIN+

## INA241A1
designator IC?
Integrated Circuit; Manufacturer_Name: Texas Instruments; Manufacturer_Part_Number: INA241A1  (SOT-23 TYPE); Datasheet Link: https://www.ti.com/lit/ds/symlink/ina241a.pdf?ts=1651132803842&ref_url=https%253A%252F%252Fwww.ti.com%252Fproduct%252FINA241A; Height: 1.1mm
footprint SOT65P280X110-8N
pins: 1 IN-, 2 GND, 3 REF2, 4 NC, 5 OUT, 6 VS, 7 REF1, 8 IN+

## INA333AIDGKR
designator IC?
Integrated Circuit; Manufacturer_Name: Texas Instruments; Manufacturer_Part_Number: INA333AIDGKR; Datasheet Link: http://www.ti.com/lit/ds/symlink/ina333.pdf; Height: 1.1mm; Mouser Part Number: 595-INA333AIDGKR; Mouser Price/Stock: https://www.mouser.co.uk/ProductDetail/Texas-Instruments/INA333AIDGKR?qs=nJRxFdq%252BlvaKwfZOdHFpKg%3D%3D; Arrow Part Number: INA333AIDGKR; Arrow Price/Stock: https://www.arrow.com/en/products/ina333aidgkr/texas-instruments?region=nac
footprint SOP65P490X110-8N
pins: 1 RG_1, 2 VIN-, 3 VIN+, 4 V-, 5 REF, 6 VOUT, 7 V+, 8 RG_2

## IP101GA
designator U?
IT ETHERNET TRANS LQFP-48(7x7); Value: IP101GA
footprint LQFP-48 (7*7mm)
part A pins: 11 DGND, 14 VDDIO, 17 DGND, 28 ISET, 29 AGND1V, 35 AGND33, 36 AVDD33, 45 DGND, 46 X1, 47 X2
part B pins: 1 COL/RMII, 2 TXEN, 3 TXD3, 4 TXD2, 5 TXD1, 6 TXD0, 7 TXCLK/50M_CLKI, 16 RXCLK/50M_CLKO, 18 RXD3, 19 RXD2, 20 RXD1, 21 RXD0, 22 RXDV/CRS_DV/FX_HEN, 23 CRS/LEDMOD, 24 RXER, 25 MDC, 26 MDIO, 27 TEST_ON, 42 ~{RESET_N}, 43 TXER/FXSD, 48 INTR
part C pins: 8 REGOUT, 9 LED0/PHY_AD0, 10 LED1/PHY_AD1, 12 LED2/PHY_AD2, 13 LED3/PHY_AD3, 30 MDI_RN, 31 MDI_RP, 33 MDI_TN, 34 MDI_TP
part D pins: 15 NC, 32 NC, 37 NC, 38 NC, 39 NC, 40 NC, 41 NC, 44 NC
part A text: Power; GND; Crystal
part B text: RX MII; TX MII; Test; Reset; Interrupt
part C text: RX In Pair; TX Out Pair; LED; /Addr

## IP175G
designator IC?
IC ETH SWITCH 5CH; Manufacturer_Name: IC+; Height: 0.9mm; Manufacturer_Part_Number: IP175G
footprint QFN40P600X600X90-49N-D
pins: 1 TXOM1, 2 TXOP1, 3 RXIM1, 4 RXIP1, 5 BGRES, 6 PLLGND, 7 PLLVCC, 8 RXIP2, 9 RXIM2, 10 TXOP2, 11 TXOM2, 12 AV33_1, 13 AV10_1, 14 RXIP3, 15 RXIM3, 16 TXOP3, 17 TXOM3, 18 AV33_2, 19 TXOM4, 20 TXOP4, 21 RXIM4, 22 RXIP4, 23 OSCI, 24 X2, 25 GND_1, 26 RESETB, 27 DVDD_1, 28 F_POWER_OFF, 29 TEST, 30 AUTO_FACTORY_TEST, 31 F_POWER_OFF_LED_/_VLAN_DIS, 32 LINK_LED4, 33 LINK_LED3, 34 PVDD, 35 LINK_LED2/RSVD_GMAC_FILTER, 36 LINK_LED1/SCLK/BF_STM_DIS, 37 LINK_LED0/SDATA/COS_DIS, 38 SCL/MDC, 39 SDA/MDIO, 40 DVDD_2, 41 VREG_LDO, 42 PVDD_LDO, 43 AV10_2, 44 RXIP0, 45 RXIM0, 46 TXOP0, 47 TXOM0, 48 AV33_3, 49 GND_2

## IP2161
designator IC?
Integrated Circuit, USB PD Controller; Manufacturer_Name: Injonic; Datasheet Link: https://datasheet.lcsc.com/lcsc/1810010618_INJOINIC-IP2163_C185473.pdf; Height: 1mm; Manufacturer_Part_Number: IP2161; Mouser Price/Stock: https://www.mouser.com/Search/Refine.aspx?Keyword=946-MP5034GJ-P; LCSC Part Number: C185471
footprint SOT95P280X110-6N
pins: 1 DP, 2 GND, 3 FB, 4 SEL, 5 VBUS, 6 DM

## IR2128STRPBF
designator IC?
Integrated Circuit; Manufacturer_Name: Infineon; Manufacturer_Part_Number: IR2128STRPBF; Datasheet Link: https://www.mouser.com/datasheet/2/196/Infineon_ir2127_DS_v01_00_EN-1227992.pdf; Height: 1.75mm; Mouser Part Number: 942-IR2128STRPBF; Mouser Price/Stock: https://www.mouser.co.uk/ProductDetail/Infineon-Technologies/IR2128STRPBF?qs=ellYJlE8XiGRviatAIz%2Fdw%3D%3D; Arrow Part Number: IR2128STRPBF; Arrow Price/Stock: https://www.arrow.com/en/products/ir2128strpbf/infineon-technologies-ag
footprint SOIC127P600X175-8N
pins: 1 VCC, 2 ~{IN}, 3 ~{FAULT}, 4 COM, 5 VS, 6 CS, 7 HO, 8 VB

## IR2184SPBF
designator IC?
Integrated Circuit; Manufacturer_Name: Infineon; Manufacturer_Part_Number: IR2184SPBF; Datasheet Link: https://www.infineon.com/cms/en/product/power/gate-driver-ics/?; Height: 1.75mm; Mouser Part Number: 942-IR2184SPBF; Mouser Price/Stock: https://www.mouser.co.uk/ProductDetail/Infineon-Technologies/IR2184SPBF?qs=dQmlx5f5cRIr5S5otnBboQ%3D%3D; Arrow Part Number: IR2184SPBF; Arrow Price/Stock: https://www.arrow.com/en/products/ir2184spbf/infineon-technologies-ag?region=europe
footprint SOIC127P600X175-8N
pins: 1 IN, 2 ~{SD}, 3 COM, 4 LO, 5 VCC, 6 VS, 7 HO, 8 VB

## IRF1405LPBF
designator Q?
MOSFET (N-Channel); Manufacturer_Name: Infineon; Manufacturer_Part_Number: IRF1405LPBF; Datasheet Link: https://www.infineon.com/dgdl/irf1405spbf.pdf?fileId=5546d462533600a4015355db101d18bd; Height: 4.83mm
footprint TO254P483X1016X1501-3P
pins: 1 G, 2 D, 3 S

## IRF1405PBF
designator Q?
MOSFET (N-Channel); Manufacturer_Name: Infineon; Manufacturer_Part_Number: IRF1405PBF; Datasheet Link: https://www.infineon.com/dgdl/irf1405pbf.pdf?fileId=5546d462533600a4015355db084a18bb; Height: 4.83mm; Mouser Part Number: 942-IRF1405PBF; Mouser Price/Stock: https://www.mouser.co.uk/ProductDetail/Infineon-Technologies/IRF1405PBF?qs=2r01AXMCG3PbVtF5tHk0jQ%3D%3D; Arrow Part Number: IRF1405PBF; Arrow Price/Stock: https://www.arrow.com/en/products/irf1405pbf/infineon-technologies-ag?region=europe
footprint TO254P483X1016X1994-3P
footprint TO254P483X1016X1994-3P_heatsink (with SK29-38S heatsink)
pins: 1 G, 2 D, 3 S

## IRF1405STR
designator Q?
MOSFET (N-Channel), 55V, 131A; Manufacturer_Name: Infineon; Datasheet Link: https://www.infineon.com/dgdl/irf1405spbf.pdf?fileId=5546d462533600a4015355db101d18bd; Height: 4.83mm; Manufacturer_Part_Number: IRF1405STR
footprint TO-263 (D2PAK)
pins: 1 G, 2 D, 3 S

## IRF7316TRPBF
designator Q?
Transistor; Manufacturer_Name: Infineon; Manufacturer_Part_Number: IRF7316TRPBF; Datasheet Link: https://datasheet.datasheetarchive.com/originals/distributors/Datasheets_SAMA/3e54ddf14293916d149d77f0514a31fb.pdf; Height: 1.75mm; Mouser Part Number: 942-IRF7316TRPBF; Mouser Price/Stock: https://www.mouser.co.uk/ProductDetail/Infineon-Technologies/IRF7316TRPBF?qs=9%252BKlkBgLFf1%252BV%2Fdbm7rl%252Bw%3D%3D; Arrow Part Number: IRF7316TRPBF; Arrow Price/Stock: https://www.arrow.com/en/products/irf7316trpbf/infineon-technologies-ag?utm_currency=USD&region=europe
footprint SOIC127P600X175-8N
pins: 1 S1, 2 G1, 3 S2, 4 G2, 5 D2_1, 6 D2_2, 7 D1_1, 8 D1_2

## IRF7341PBF
designator Q?
Transistor; Manufacturer_Name: Infineon; Manufacturer_Part_Number: IRF7341PBF; Datasheet Link: https://www.infineon.com/dgdl/irf7341pbf.pdf?fileId=5546d462533600a4015355f64f031b63; Height: 1.75mm; Mouser Part Number: 942-IRF7341PBF; Mouser Price/Stock: https://www.mouser.com/Search/Refine.aspx?Keyword=942-IRF7341PBF; Arrow Part Number: IRF7341PBF; Arrow Price/Stock: https://www.arrow.com/en/products/irf7341pbf/infineon-technologies-ag
footprint SOIC127P600X175-8N
pins: 1 S1, 2 G1, 3 S2, 4 G2, 5 D2_1, 6 D2_2, 7 D1_1, 8 D1_2

## IRF7343PBF
designator Q?
MOSFET DUAL P/N-ch 5/-5A; Manufacturer_Name: Infineon; Datasheet Link: https://www.infineon.com/dgdl/irf7343pbf.pdf?fileId=5546d462533600a4015355f68c1a1b73; Height: 1.75mm; Manufacturer_Part_Number: IRF7343PBF; Mouser Part Number: 942-IRF7343PBF; Mouser Price/Stock: https://www.mouser.co.uk/ProductDetail/Infineon-IR/IRF7343PBF?qs=oV44URRYgr3BtQItr9FXKw%3D%3D; Arrow Part Number: IRF7343PBF; Arrow Price/Stock: https://www.arrow.com/en/products/irf7343pbf/infineon-technologies-ag
footprint SOIC127P600X175-8N
part A pins: 1 S1, 2 G1, 7 D1_1, 8 D1_2
part B pins: 3 S2, 4 G2, 5 D2_1, 6 D2_2

## IRF9310TRPBF
designator Q?
MOSFET (P-Channel); Manufacturer_Name: Infineon; Manufacturer_Part_Number: IRF9310TRPBF; Datasheet Link: http://uk.rs-online.com/web/p/products/8273912; Height: 1.75mm; Mouser Part Number: 942-IRF9310TRPBF; Mouser Price/Stock: https://www.mouser.co.uk/ProductDetail/Infineon-IR/IRF9310TRPBF?qs=9%252BKlkBgLFf0NoechZyOTDg%3D%3D; Arrow Part Number: IRF9310TRPBF; Arrow Price/Stock: https://www.arrow.com/en/products/irf9310trpbf/infineon-technologies-ag
footprint SOIC127P600X175-8N
pins: 1 S_1, 2 S_2, 3 S_3, 4 G, 5 D_1, 6 D_2, 7 D_3, 8 D_4

## IRFL9110PBF
designator Q?
MOSFET (P-Channel) 100V 1.1A SOT223; Manufacturer_Name: Vishay; Datasheet Link: http://www.vishay.com/docs/91196/sihfl911.pdf; Height: 1.8mm; Manufacturer_Part_Number: IRFL9110PBF; Mouser Part Number: 844-IRFL9110PBF; Mouser Price/Stock: https://www.mouser.com/Search/Refine.aspx?Keyword=844-IRFL9110PBF
footprint SOT230P700X180-4N; pin to pad 2>2+4
pins: 1 G, 2 D, 3 S

## IRFP2907PBF
designator Q?
MOSFET (N-Channel); Manufacturer_Name: Infineon; Manufacturer_Part_Number: IRFP2907PBF; Datasheet Link: https://www.infineon.com/dgdl/irfp2907pbf.pdf?fileId=5546d462533600a401535628b2d51fe8; Height: 5.31mm; Mouser Part Number: 942-IRFP2907PBF; Mouser Price/Stock: https://www.mouser.co.uk/ProductDetail/Infineon-Technologies/IRFP2907PBF?qs=XgnB68EmdM1ZjadeHZwM5g%3D%3D; Arrow Part Number: IRFP2907PBF; Arrow Price/Stock: https://www.arrow.com/en/products/irfp2907pbf/infineon-technologies-ag
footprint TO546P531X1558X2499-3P (Footprint not found)
pins: 1 G, 2 D, 3 S

## IRFR3910TRPBF
designator Q?
Transistor; Manufacturer_Name: Infineon; Manufacturer_Part_Number: IRFR3910TRPBF; Datasheet Link: https://datasheet.datasheetarchive.com/originals/distributors/Datasheets_SAMA/52abf61b6082e0f6e43a5ed063c01714.pdf; Height: 2.39mm; Mouser Part Number: 942-IRFR3910TRPBF; Mouser Price/Stock: https://www.mouser.co.uk/ProductDetail/Infineon-IR/IRFR3910TRPBF?qs=XgnB68EmdM1RmOWRQY7vfw%3D%3D; Arrow Part Number: IRFR3910TRPBF; Arrow Price/Stock: https://www.arrow.com/en/products/irfr3910trpbf/infineon-technologies-ag?region=nac
footprint TO229P990X238-4N
pins: 1 G, 2 D, 3 S, 4 D

## IRFR5410TRPBF
designator Q?
Transistor; Manufacturer_Name: Infineon; Manufacturer_Part_Number: IRFR3910TRPBF; Datasheet Link: https://datasheet.datasheetarchive.com/originals/distributors/Datasheets_SAMA/52abf61b6082e0f6e43a5ed063c01714.pdf; Height: 2.39mm; Mouser Part Number: 942-IRFR3910TRPBF; Mouser Price/Stock: https://www.mouser.co.uk/ProductDetail/Infineon-IR/IRFR3910TRPBF?qs=XgnB68EmdM1RmOWRQY7vfw%3D%3D; Arrow Part Number: IRFR3910TRPBF; Arrow Price/Stock: https://www.arrow.com/en/products/irfr3910trpbf/infineon-technologies-ag?region=nac
footprint TO229P990X238-4N
pins: 1 G, 2 D, 3 S, 4 D

## IRFR7546TRPBF
designator Q?
MOSFET (N-Channel); Manufacturer_Name: Infineon; Manufacturer_Part_Number: IRFR7546TRPBF; Datasheet Link: https://www.infineon.com/dgdl/Infineon-IRFR7546-DataSheet-v01_01-EN.pdf?fileId=5546d462533600a401535635b9b3211f; Height: 2.52mm; Mouser Part Number: 942-IRFR7546TRPBF; Mouser Price/Stock: https://www.mouser.co.uk/ProductDetail/Infineon-IR/IRFR7546TRPBF?qs=NBFAU1oqP4VxNaQV6oj2cA%3D%3D; Arrow Part Number: IRFR7546TRPBF; Arrow Price/Stock: https://www.arrow.com/en/products/irfr7546trpbf/infineon-technologies-ag?region=nac
footprint IRFR7546TRPBF
pins: 1 G, 2 D, 3 S

## IRFS4229TRLPBF
designator Q?
MOSFET (N-Channel); Manufacturer_Name: Infineon; Manufacturer_Part_Number: IRFS4229TRLPBF; Datasheet Link: https://www.infineon.com/dgdl/irfs4229pbf.pdf?fileId=5546d462533600a401535639fdc421a1; Height: 5.084mm; Mouser Part Number: 942-IRFS4229TRLPBF; Mouser Price/Stock: https://www.mouser.co.uk/ProductDetail/Infineon-IR/IRFS4229TRLPBF?qs=9%252BKlkBgLFf0h%2FVzcoVYklQ%3D%3D; Arrow Part Number: IRFS4229TRLPBF; Arrow Price/Stock: https://www.arrow.com/en/products/irfs4229trlpbf/infineon-technologies-ag?utm_currency=USD&region=nac
footprint IRFS4229TRLPBF
pins: 1 G, 2 D, 3 S

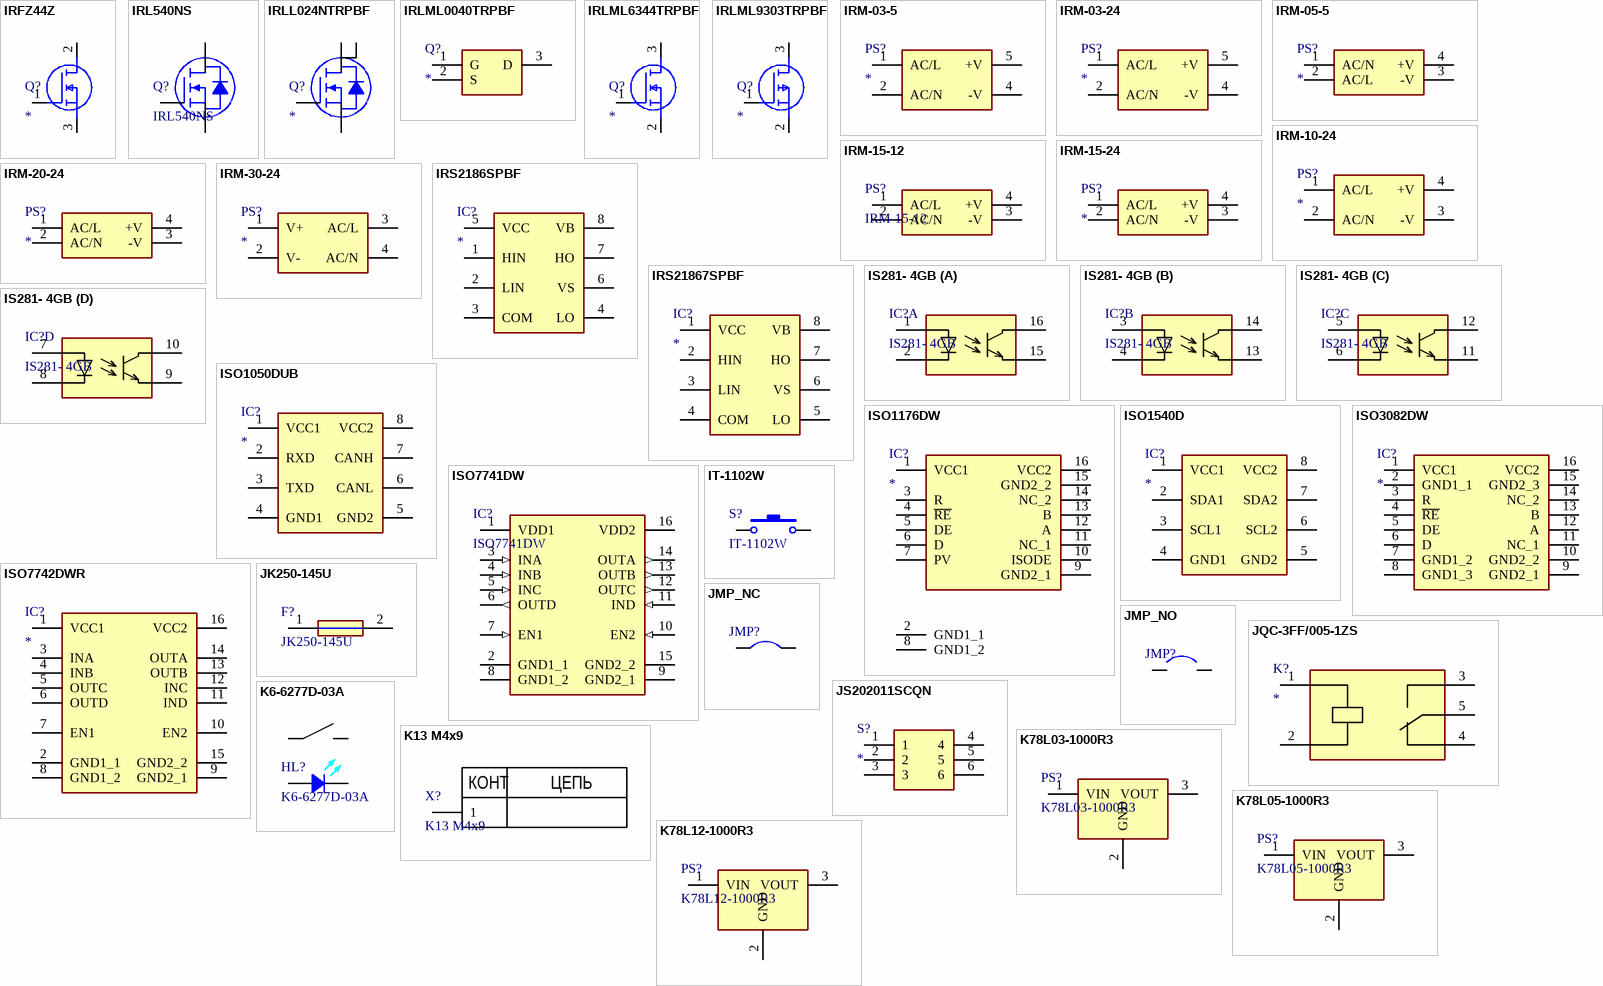
[diagram p19: symbols IRFZ44Z to K78L12-1000R3]

## IRFZ44Z
designator Q?
MOSFET (N-Channel); Manufacturer_Name: Infineon; Manufacturer_Part_Number: IRFZ44Z; Datasheet Link: https://datasheet.datasheetarchive.com/originals/dk/DKDS-13/253960.pdf; Height: 4.69mm
footprint TO254P469X1042X1967-3P
pins: 1 G, 2 D, 3 S

## IRL540NS
designator Q?
MOSFET (N-Channel), 100V, 36A; Manufacturer_Name: Infineon; Manufacturer_Part_Number: IRL540NSTRLPBF; Datasheet Link: https://www.infineon.com/dgdl/Infineon-IRLL024N-DS-v01_02-EN.pdf?fileId=5546d462533600a401535664451725d3; Height: 1.8mm
footprint TO-263 (D2PAK)
pins: 1 G, 2 D, 3 S

## IRLL024NTRPBF
designator Q?
MOSFET (N-Channel); Manufacturer_Name: Infineon; Manufacturer_Part_Number: IRLL024NTRPBF; Datasheet Link: https://www.infineon.com/dgdl/Infineon-IRLL024N-DS-v01_02-EN.pdf?fileId=5546d462533600a401535664451725d3; Height: 1.8mm; Mouser Part Number: 942-IRLL024NTRPBF; Mouser Price/Stock: https://www.mouser.co.uk/ProductDetail/Infineon-Technologies/IRLL024NTRPBF?qs=9%252BKlkBgLFf2jug2IEBryTg%3D%3D; Arrow Part Number: IRLL024NTRPBF; Arrow Price/Stock: https://www.arrow.com/en/products/irll024ntrpbf/infineon-technologies-ag?utm_currency=USD&region=nac
footprint SOT230P700X180-4N
pins: 1 G, 2 D, 3 S, 4 D

## IRLML0040TRPBF
designator Q?
Transistor; Manufacturer_Name: Infineon; Manufacturer_Part_Number: IRLML0040TRPBF; Datasheet Link: https://www.infineon.com/dgdl/irlml0040pbf.pdf?fileId=5546d462533600a401535664894825e4; Height: 1.12mm; Mouser Part Number: 942-IRLML0040TRPBF; Mouser Price/Stock: https://www.mouser.co.uk/ProductDetail/Infineon-Technologies/IRLML0040TRPBF?qs=9%252BKlkBgLFf00XkbMz%2F7COA%3D%3D; Arrow Part Number: IRLML0040TRPBF; Arrow Price/Stock: https://www.arrow.com/en/products/irlml0040trpbf/infineon-technologies-ag?region=nac
footprint SOT95P237X112-3N
pins: 1 G, 2 S, 3 D

## IRLML6344TRPBF
designator Q?
MOSFET (N-Channel); Manufacturer_Name: Infineon; Manufacturer_Part_Number: IRLML6344TRPBF; Datasheet Link: https://www.infineon.com/dgdl/irlml6344pbf.pdf?fileId=5546d462533600a4015356689c44262c; Height: 1.12mm; Mouser Part Number: 942-IRLML6344TRPBF; Mouser Price/Stock: https://www.mouser.co.uk/ProductDetail/Infineon-Technologies/IRLML6344TRPBF?qs=9%252BKlkBgLFf2w4qS48UOXVw%3D%3D; Arrow Part Number: IRLML6344TRPBF; Arrow Price/Stock: https://www.arrow.com/en/products/irlml6344trpbf/infineon-technologies-ag.html?utm_currency=USD&region=europe
footprint SOT95P237X112-3N
pins: 1 G, 2 S, 3 D

## IRLML9303TRPBF
designator Q?
MOSFET (P-Channel); Manufacturer_Name: Infineon; Manufacturer_Part_Number: IRLML9303TRPBF; Datasheet Link: https://www.infineon.com/dgdl/irlml9303pbf.pdf?fileId=5546d462533600a401535668ef1d2642; Height: 1.12mm; Mouser Part Number: 942-IRLML9303TRPBF; Mouser Price/Stock: https://www.mouser.co.uk/ProductDetail/Infineon-Technologies/IRLML9303TRPBF?qs=9%252BKlkBgLFf05a7CIFh1iNQ%3D%3D; Arrow Part Number: IRLML9303TRPBF; Arrow Price/Stock: https://www.arrow.com/en/products/irlml9303trpbf/infineon-technologies-ag?region=nac
footprint SOT95P237X112-3N
pins: 1 G, 2 S, 3 D

## IRM-03-5
designator PS?
Power Supply; Manufacturer_Name: Mean Well; Manufacturer_Part_Number: IRM-03-5; Datasheet Link: https://www.meanwell.com/Upload/PDF/IRM-03/IRM-03-SPEC.PDF; Height: 15.5mm; Mouser Part Number: 709-IRM03-5; Mouser Price/Stock: https://www.mouser.co.uk/ProductDetail/MEAN-WELL/IRM-03-5?qs=NKmfXavxMazJdFbXlu0eDA%3D%3D; Arrow Part Number: IRM-03-5; Arrow Price/Stock: https://www.arrow.com/en/products/irm-03-5/mean-well-enterprises?utm_currency=USD&region=europe
footprint IRM035 (Footprint not found)
pins: 1 AC/L, 2 AC/N, 4 -V, 5 +V

## IRM-03-24
designator PS?
Power Supply; Manufacturer_Name: Mean Well; Manufacturer_Part_Number: IRM-03-24; Datasheet Link: https://www.meanwell.com/Upload/PDF/IRM-03/IRM-03-SPEC.PDF; Height: 15.5mm; Mouser Part Number: 709-IRM03-24; Mouser Price/Stock: https://www.mouser.co.uk/ProductDetail/MEAN-WELL/IRM-03-24?qs=NKmfXavxMay6RYM1XoT5bQ%3D%3D; Arrow Part Number: IRM-03-24; Arrow Price/Stock: https://www.arrow.com/en/products/irm-03-24/mean-well-enterprises?utm_currency=USD&region=europe
footprint IRM035 (Footprint not found)
pins: 1 AC/L, 2 AC/N, 4 -V, 5 +V

## IRM-05-5
designator PS?
Power Supply; Manufacturer_Name: Mean Well; Manufacturer_Part_Number: IRM-05-5; Datasheet Link: https://www.mouser.fr/datasheet/2/260/r1936_3-1109422.pdf; Height: 21.5mm; Mouser Part Number: 709-IRM05-5; Mouser Price/Stock: https://www.mouser.co.uk/ProductDetail/MEAN-WELL/IRM-05-5?qs=WkdRfq4wf1OdYoHS8Am9VA%3D%3D; Arrow Part Number: IRM-05-5; Arrow Price/Stock: https://www.arrow.com/en/products/irm-05-5/mean-well-enterprises?region=europe
footprint IRM055
pins: 1 AC/N, 2 AC/L, 3 -V, 4 +V

## IRM-10-24
designator PS?
Power Supply; Manufacturer_Name: Mean Well; Manufacturer_Part_Number: IRM-10-24; Datasheet Link: https://www.meanwell.com/Upload/PDF/IRM-10/IRM-10-SPEC.PDF; Mouser Part Number: 709-IRM10-24; Mouser Price/Stock: https://www.mouser.co.uk/ProductDetail/MEAN-WELL/IRM-10-24?qs=WkdRfq4wf1NO1GZglXcDxA%3D%3D; Arrow Part Number: IRM-10-24; Arrow Price/Stock: https://www.arrow.com/en/products/irm-10-24/mean-well-enterprises?utm_currency=USD&region=europe
footprint IRM-10
pins: 1 AC/L, 2 AC/N, 3 -V, 4 +V

## IRM-15-12
designator PS?
Power Supply 220->12V; Manufacturer_Name: Mean Well; Datasheet Link: https://componentsearchengine.com/Datasheets/2/IRM-15-24.pdf; Manufacturer_Part_Number: IRM-15-12; Mouser Part Number: 709-IRM15-12; Mouser Price/Stock: https://www.mouser.co.uk/ProductDetail/MEAN-WELL/IRM-15-24?qs=WkdRfq4wf1PZSEWhZtKDbQ%3D%3D; Arrow Part Number: IRM-15-24; Arrow Price/Stock: https://www.arrow.com/en/products/irm-15-24/mean-well-enterprises?utm_currency=USD&region=europe
footprint IRM-15
pins: 1 AC/L, 2 AC/N, 3 -V, 4 +V

## IRM-15-24
designator PS?
Power Supply; Manufacturer_Name: Mean Well; Manufacturer_Part_Number: IRM-15-24; Datasheet Link: https://componentsearchengine.com/Datasheets/2/IRM-15-24.pdf; Mouser Part Number: 709-IRM15-24; Mouser Price/Stock: https://www.mouser.co.uk/ProductDetail/MEAN-WELL/IRM-15-24?qs=WkdRfq4wf1PZSEWhZtKDbQ%3D%3D; Arrow Part Number: IRM-15-24; Arrow Price/Stock: https://www.arrow.com/en/products/irm-15-24/mean-well-enterprises?utm_currency=USD&region=europe
footprint IRM-15
pins: 1 AC/L, 2 AC/N, 3 -V, 4 +V

## IRM-20-24
designator PS?
Power Supply; Manufacturer_Name: Mean Well; Manufacturer_Part_Number: IRM-20-24; Datasheet Link: https://www.meanwell-web.com/content/files/pdfs/productPdfs/MW/IRM-20/IRM-20-spec.pdf; Height: 24mm; Mouser Part Number: 709-IRM20-24; Mouser Price/Stock: https://www.mouser.co.uk/ProductDetail/MEAN-WELL/IRM-20-24?qs=WkdRfq4wf1PztyfgJARp0A%3D%3D; Arrow Part Number: IRM-20-24; Arrow Price/Stock: https://www.arrow.com/en/products/irm-20-24/mean-well-enterprises?utm_currency=USD&region=europe
footprint IRM2024
pins: 1 AC/L, 2 AC/N, 3 -V, 4 +V

## IRM-30-24
designator PS?
Power Supply; Manufacturer_Name: Mean Well; Manufacturer_Part_Number: IRM-30-24; Datasheet Link: https://datasheet.datasheetarchive.com/originals/distributors/DKDS-14/277834.pdf; Mouser Part Number: 709-IRM30-24; Mouser Price/Stock: https://www.mouser.co.uk/ProductDetail/MEAN-WELL/IRM-30-24?qs=Ubm%252Bqu3%2FQAuqOQwEFhBB8g%3D%3D; Arrow Part Number: IRM-30-24; Arrow Price/Stock: https://www.arrow.com/en/products/irm-30-24/mean-well-enterprises
footprint IRM-30-24
pins: 1 V+, 2 V-, 3 AC/L, 4 AC/N

## IRS2186SPBF
designator IC?
Integrated Circuit; Manufacturer_Name: Infineon; Manufacturer_Part_Number: IRS2186SPBF; Datasheet Link: https://www.infineon.com/cms/en/product/power/gate-driver-ics/?; Height: 1.75mm; Mouser Part Number: 942-IRS2186SPBF; Mouser Price/Stock: https://www.mouser.co.uk/ProductDetail/Infineon-Technologies/IRS2186SPbF?qs=ellYJlE8XiF9fMpCJZhfAg%3D%3D; Arrow Part Number: IRS2186SPBF; Arrow Price/Stock: https://www.arrow.com/en/products/irs2186spbf/infineon-technologies-ag?region=europe
footprint SOIC127P600X175-8N
pins: 1 HIN, 2 LIN, 3 COM, 4 LO, 5 VCC, 6 VS, 7 HO, 8 VB

## IRS21867SPBF
designator IC?
Integrated Circuit; Manufacturer_Name: Infineon; Manufacturer_Part_Number: IRS21867SPBF; Datasheet Link: https://www.infineon.com/cms/en/product/power/gate-driver-ics/?; Height: 1.75mm; Mouser Part Number: 942-IRS21867SPBF; Mouser Price/Stock: https://www.mouser.co.uk/ProductDetail/Infineon-Technologies/IRS21867SPBF?qs=Z8%252BeY1k3TIIQPD0B9bASkw%3D%3D; Arrow Part Number: IRS21867SPBF; Arrow Price/Stock: https://www.arrow.com/en/products/irs21867spbf/infineon-technologies-ag?region=nac
footprint SOIC127P600X175-8N
pins: 1 VCC, 2 HIN, 3 LIN, 4 COM, 5 LO, 6 VS, 7 HO, 8 VB

## IS281- 4GB
designator IC?
OPTOISOLATOR 3.75KV 4CH TRANS; Manufacturer_Name: Lite-On; Manufacturer_Part_Number: LTV847S; Datasheet Link: https://www.mouser.pe/datasheet/2/239/LTV-8X7_series_201610_-1544776.pdf; Height: 4.6mm
footprint SOIC127P700X210-16N
part A pins: 1 A_1, 2 K_1, 15 E_4, 16 C_4
part B pins: 3 A_2, 4 K_2, 13 E_3, 14 C_3
part C pins: 5 A_3, 6 K_3, 11 E_2, 12 C_2
part D pins: 7 A_4, 8 K_4, 9 E_1, 10 C_1

## ISO1050DUB
designator IC?
Integrated Circuit, CAN Isolator; Manufacturer_Name: Texas Instruments; Manufacturer_Part_Number: ISO1050DUB; Datasheet Link: https://datasheet.datasheetarchive.com/originals/distributors/Datasheets-SFU2/DSASFU100032000.pdf; Height: 4.85mm; Mouser Part Number: 595-ISO1050DUB; Mouser Price/Stock: https://www.mouser.co.uk/ProductDetail/Texas-Instruments/ISO1050DUB?qs=IK5e5L0zOXiBKtns%252BwxBWw%3D%3D; Arrow Part Number: ISO1050DUB; Arrow Price/Stock: https://www.arrow.com/en/products/iso1050dub/texas-instruments?region=nac
footprint SOP254P1040X485-8N
pins: 1 VCC1, 2 RXD, 3 TXD, 4 GND1, 5 GND2, 6 CANL, 7 CANH, 8 VCC2

## ISO1176DW
designator IC?
Integrated Circuit; Manufacturer_Name: Texas Instruments; Manufacturer_Part_Number: ISO1176DW; Datasheet Link: http://www.ti.com/lit/gpn/iso1176; Height: 2.65mm; Mouser Part Number: 595-ISO1176DW; Mouser Price/Stock: https://www.mouser.co.uk/ProductDetail/Texas-Instruments/ISO1176DW?qs=wkx8pu8tL7LYSzCGIYzYEQ%3D%3D; Arrow Part Number: ISO1176DW; Arrow Price/Stock: https://www.arrow.com/en/products/iso1176dw/texas-instruments?region=nac
footprint SOIC127P1030X265-16N
pins: 1 VCC1, 2 GND1_1, 3 R, 4 ~{RE}, 5 DE, 6 D, 7 PV, 8 GND1_2, 9 GND2_1, 10 ISODE, 11 NC_1, 12 A, 13 B, 14 NC_2, 15 GND2_2, 16 VCC2

## ISO1540D
designator IC?
Integrated Circuit, I2C Isolator; Manufacturer_Name: Texas Instruments; Manufacturer_Part_Number: ISO1540D; Datasheet Link: http://www.ti.com/lit/gpn/iso1540; Height: 1.75mm; Mouser Part Number: 595-ISO1540D; Mouser Price/Stock: https://www.mouser.co.uk/ProductDetail/Texas-Instruments/ISO1540D?qs=rg6Iqu58vpWvO86XnJi3%2Fg%3D%3D; Arrow Part Number: ISO1540D; Arrow Price/Stock: null?region=nac
footprint SOIC127P600X175-8N
pins: 1 VCC1, 2 SDA1, 3 SCL1, 4 GND1, 5 GND2, 6 SCL2, 7 SDA2, 8 VCC2

## ISO3082DW
designator IC?
IC, RS-485 Driver +  Isolator; Manufacturer_Name: Texas Instruments; Manufacturer_Part_Number: ISO3082DW; Datasheet Link: http://uk.rs-online.com/web/p/products/7092255; Height: 2.65mm; Mouser Part Number: 595-ISO3082DW; Mouser Price/Stock: https://www.mouser.co.uk/ProductDetail/Texas-Instruments/ISO3082DW?qs=5gBG3L055oOba23GzaXsQQ%3D%3D; Arrow Part Number: ISO3082DW; Arrow Price/Stock: https://www.arrow.com/en/products/iso3082dw/texas-instruments?region=asia
footprint SOIC127P1030X265-16N
pins: 1 VCC1, 2 GND1_1, 3 R, 4 ~{RE}, 5 DE, 6 D, 7 GND1_2, 8 GND1_3, 9 GND2_1, 10 GND2_2, 11 NC_1, 12 A, 13 B, 14 NC_2, 15 GND2_3, 16 VCC2

## ISO7741DW
designator IC?
High-Speed Digital Isolator; Manufacturer_Name: Texas Instruments; Datasheet Link: http://www.ti.com/lit/gpn/iso7741; Height: 2.65mm; Manufacturer_Part_Number: ISO7741DW; Mouser Part Number: 595-ISO7741DW; Mouser Price/Stock: https://www.mouser.co.uk/ProductDetail/Texas-Instruments/ISO7741DW?qs=dSktwyqbRaUrT%2FInALe%2Fqw%3D%3D; Arrow Part Number: ISO7741DW; Arrow Price/Stock: https://www.arrow.com/en/products/iso7741dw/texas-instruments?utm_currency=USD&region=asia
footprint SOIC127P1030X265-16N
pins: 1 VDD1, 2 GND1_1, 3 INA (in), 4 INB (in), 5 INC (in), 6 OUTD (out), 7 EN1 (in), 8 GND1_2, 9 GND2_1, 10 EN2 (in), 11 IND (in), 12 OUTC (out), 13 OUTB (out), 14 OUTA (out), 15 GND2_2, 16 VDD2

## ISO7742DWR
designator IC?
Integrated Circuit; Manufacturer_Name: Texas Instruments; Manufacturer_Part_Number: ISO7742DWR; Datasheet Link: http://www.ti.com/lit/ds/symlink/iso7741.pdf; Height: 2.65mm; Mouser Part Number: 595-ISO7742DWR; Mouser Price/Stock: https://www.mouser.co.uk/ProductDetail/Texas-Instruments/ISO7742DWR?qs=dSktwyqbRaUowi%252BZ6jL%252B7A%3D%3D; Arrow Part Number: ISO7742DWR; Arrow Price/Stock: https://www.arrow.com/en/products/iso7742dwr/texas-instruments?utm_currency=USD&region=nac
footprint SOIC127P1030X265-16N
pins: 1 VCC1, 2 GND1_1, 3 INA, 4 INB, 5 OUTC, 6 OUTD, 7 EN1, 8 GND1_2, 9 GND2_1, 10 EN2, 11 IND, 12 INC, 13 OUTB, 14 OUTA, 15 GND2_2, 16 VCC2

## IT-1102W
designator S?
Switch Tact; Manufacturer_Name: Ruichi; Datasheet Link: https://ruelectronics.com/files/IT-1102W%20(6x6x4,3)_83348-324dcfca74f1cc36817aee9d5b4f5ec5.pdf; Height: 5mm; Manufacturer_Part_Number: IT-1102W
footprint IT-1102W (6mm tactile button); pin to pad 1>1+2 2>3+4
pins: 1, 2

## JK250-145U
designator F?
PTC 250V 145mA Plugin Resettable Fuses; Manufacturer_Name: JinRui; Datasheet Link: https://www.lcsc.com/datasheet/lcsc_datasheet_2304140030_Jinrui-Electronic-Materials-Co--JK250-145U_C369131.pdf; Height: 10.5mm; Manufacturer_Part_Number: JK250-145U; LCSC: C369131
footprint TRF250183
pins: 1, 2

## JMP_NC
designator JMP?  (value not drawn)
Manufacturer_Name: JST (JAPAN SOLDERLESS TERMINALS); Manufacturer_Part_Number: S4B-PH-SM4-TB(LF)(SN); Datasheet Link: http://uk.rs-online.com/web/p/products/6881366; Arrow Part Number: S4B-PH-SM4-TB(LF)(SN); Arrow Price/Stock: https://www.arrow.com/en/products/s4b-ph-sm4-tb-lf-sn/jst-manufacturing
footprint SOLDER_JUMPER_NC (Footprint not found)
pins: 1, 2

## JMP_NO
designator JMP?  (value not drawn)
Manufacturer_Name: JST (JAPAN SOLDERLESS TERMINALS); Manufacturer_Part_Number: S4B-PH-SM4-TB(LF)(SN); Datasheet Link: http://uk.rs-online.com/web/p/products/6881366; Arrow Part Number: S4B-PH-SM4-TB(LF)(SN); Arrow Price/Stock: https://www.arrow.com/en/products/s4b-ph-sm4-tb-lf-sn/jst-manufacturing
footprint SOLDER_JUMPER
pins: 1, 2

## JQC-3FF/005-1ZS
designator K?
Relay or Contactor; Manufacturer_Name: HF(Xiamen Hongfa Electroacoustic); Manufacturer_Part_Number: JQC-3FF/005-1ZS; Datasheet Link: https://img.ozdisan.com/ETicaret_Dosya/341245_8627675.pdf; Height: 15.5mm; LCSC Part #: C9221
footprint JQC3FT731Z12VDC
pins: 1 COIL_1, 2 NC, 3 NO, 4 COIL_2, 5 COM

## JS202011SCQN
designator S?
Switch; Manufacturer_Name: C & K COMPONENTS; Manufacturer_Part_Number: JS202011SCQN; Datasheet Link: https://www.ckswitches.com/media/1422/js.pdf; Height: 5.5mm; Mouser Part Number: 611-JS202011SCQN; Mouser Price/Stock: https://www.mouser.co.uk/ProductDetail/CK/JS202011SCQN?qs=LgMIjt8LuD95JYWxZ7NvZA%3D%3D; Arrow Part Number: JS202011SCQN; Arrow Price/Stock: https://www.arrow.com/en/products/js202011scqn/ck?region=nac
footprint JS202011SCQN (Footprint not found)
pins: 1, 2, 3, 4, 5, 6